# Altium schematic symbol library TMP117MAIDRVR.SchLib: 1 symbol
Pins are listed as number, name and electrical type; pins without a type are passive.

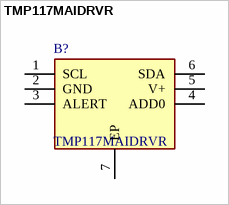
[diagram p0: symbol TMP117MAIDRVR]

## TMP117MAIDRVR
designator B?
+/-0.1C Accurate Digital Temperature Sensor with Integrated NV Memory; Manufacturer_Name: Texas Instruments; Geometry.Height: 0.8mm; Manufacturer_Part_Number: TMP117MAIDRVR; Mouser Part Number: 595-TMP117MAIDRVR; Mouser Price/Stock: https://www.mouser.co.uk/ProductDetail/Texas-Instruments/TMP117MAIDRVR?qs=qSfuJ%252Bfl%2Fd6ns6kYPunSVg%3D%3D; Arrow Part Number: TMP117MAIDRVR; Arrow Price/Stock: https://www.arrow.com/en/products/tmp117maidrvr/texas-instruments.html?utm_currency=USD&region=nac; Datasheet Link: http://www.ti.com/lit/gpn/tmp117
footprint SON65P200X200X80-7N
pins: 1 SCL, 2 GND, 3 ALERT, 4 ADD0, 5 V+, 6 SDA, 7 EP